# Altium footprint library WR-MPC3.PcbLib: 235 footprints (part 5 of 15)
Each footprint in its own frame and in the unit in brackets; x right, y up, seen from the top. Pads: shape width x height; smd on the part's side, far side on the other; paste and mask are expansions set on the pad; w line width, h text height; cw(c..) or ccw(c..) is an arc to the next point about the centre after c.
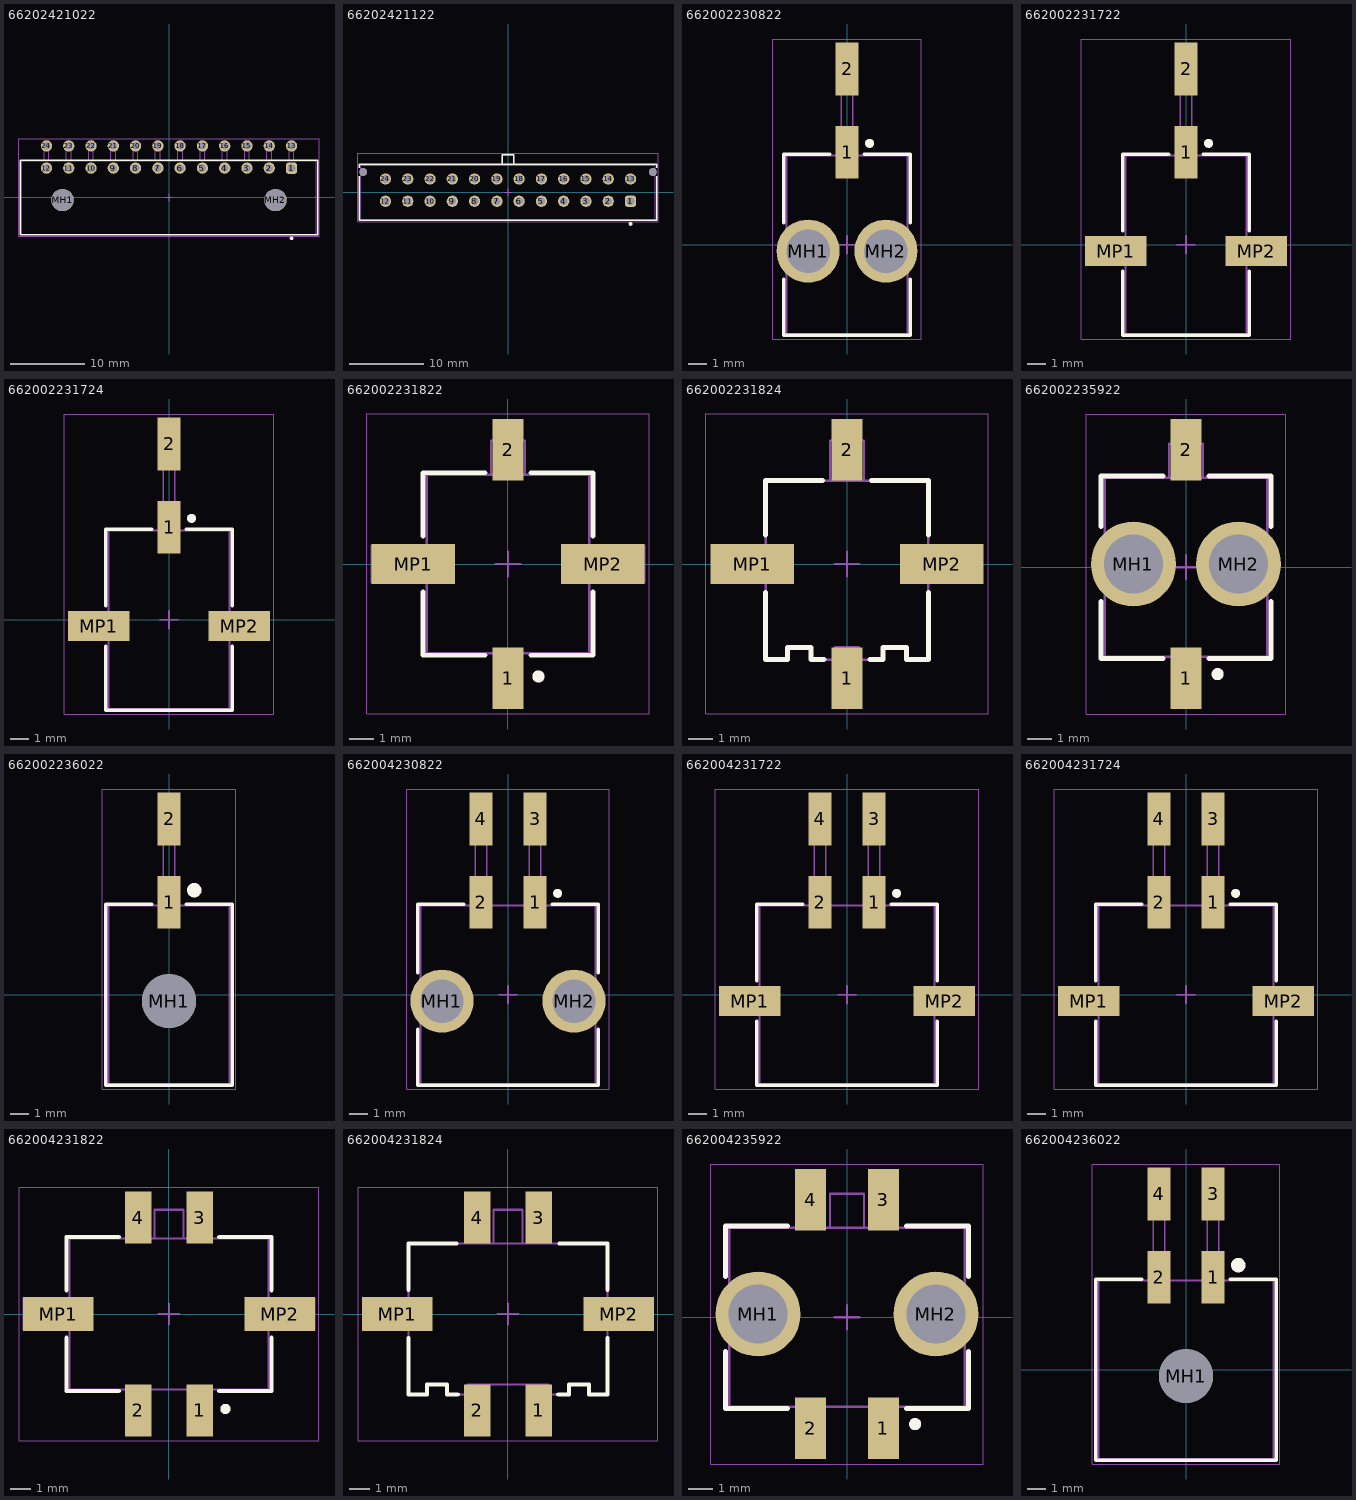
[diagram p4: the footprints below, top view; thin cyan lines are the x and y axes]

## 66202421022 [mm] "Dual row Right angle header With plastic peg 24p"
height 8.76
pads (26):
  rrect50% 1.52x1.52 hole 1.02: 1(16.5,3.95)
  round 1.52 hole 1.02: 2(13.5,3.95) 3(10.5,3.95) 4(7.5,3.95) 5(4.5,3.95) 6(1.5,3.95) 7(-1.5,3.95) 8(-4.5,3.95) 9(-7.5,3.95) 10(-10.5,3.95) 11(-13.5,3.95) 12(-16.5,3.95) 13(16.5,6.95) 14(13.5,6.95) 15(10.5,6.95) 16(7.5,6.95) 17(4.5,6.95) 18(1.5,6.95) 19(-1.5,6.95) 20(-4.5,6.95) 21(-7.5,6.95) 22(-10.5,6.95) 23(-13.5,6.95) 24(-16.5,6.95)
  round 3 hole 3 unplated: MH1(-14.34,-0.35) MH2(14.34,-0.35)
Top Overlay:
  circle w0.25: c16.5,-5.5 r0.125
  lines w0.2: -20,-5.025 -20,5.025 20,5.025 20,-5.025 -20,-5.025
Top Assembly:
  lines w0.1: -16.82,4.95 -16.82,7.27 -16.18,7.27 -16.18,4.95 ; -13.82,4.95 -13.82,7.27 -13.18,7.27 -13.18,4.95 ; -10.82,4.95 -10.82,7.27 -10.18,7.27 -10.18,4.95 ; -7.82,4.95 -7.82,7.27 -7.18,7.27 -7.18,4.95 ; -4.82,4.95 -4.82,7.27 -4.18,7.27 -4.18,4.95 ; -1.82,4.95 -1.82,7.27 -1.18,7.27 -1.18,4.95 ; 1.18,4.95 1.18,7.27 1.82,7.27 1.82,4.95 ; 4.18,4.95 4.18,7.27 4.82,7.27 4.82,4.95 ; 7.18,4.95 7.18,7.27 7.82,7.27 7.82,4.95 ; 10.18,4.95 10.18,7.27 10.82,7.27 10.82,4.95 ; 13.18,4.95 13.18,7.27 13.82,7.27 13.82,4.95 ; 16.18,4.95 16.18,7.27 16.82,7.27 16.82,4.95 ; -19.85,-4.95 -19.85,4.95 19.85,4.95 19.85,-4.95 -19.85,-4.95
Top Designator:
  text ".Designator" at -3.647,-0.357 h1
Top 3D Body:
  lines w0.1: -16.82,4.95 -16.82,7.27 -16.18,7.27 -16.18,4.95 ; -13.82,4.95 -13.82,7.27 -13.18,7.27 -13.18,4.95 ; -10.82,4.95 -10.82,7.27 -10.18,7.27 -10.18,4.95 ; -7.82,4.95 -7.82,7.27 -7.18,7.27 -7.18,4.95 ; -4.82,4.95 -4.82,7.27 -4.18,7.27 -4.18,4.95 ; -1.82,4.95 -1.82,7.27 -1.18,7.27 -1.18,4.95 ; 1.18,4.95 1.18,7.27 1.82,7.27 1.82,4.95 ; 4.18,4.95 4.18,7.27 4.82,7.27 4.82,4.95 ; 7.18,4.95 7.18,7.27 7.82,7.27 7.82,4.95 ; 10.18,4.95 10.18,7.27 10.82,7.27 10.82,4.95 ; 13.18,4.95 13.18,7.27 13.82,7.27 13.82,4.95 ; 16.18,4.95 16.18,7.27 16.82,7.27 16.82,4.95 ; -19.85,-4.95 19.85,-4.95 19.85,4.95 -19.85,4.95 -19.85,-4.95
Top Courtyard:
  lines w0.05: -20.2,-5.225 -20.2,7.91 20.2,7.91 20.2,-5.225 -20.2,-5.225
Top Component Center:
  lines w0.1: -0.5,0 0.5,0 ; 0,-0.5 0,0.5
3D body "62002421022.stp": height 8.79, standoff -3.17, extent -19.85,-4.95 19.85,7.27

## 66202421122 [mm] "Dual row Vertical header 26p"
height 9.9
pads (26):
  rrect50% 1.52x1.52 hole 1.02: 1(16.5,-1.2)
  round 1.52 hole 1.02: 2(13.5,-1.2) 3(10.5,-1.2) 4(7.5,-1.2) 5(4.5,-1.2) 6(1.5,-1.2) 7(-1.5,-1.2) 8(-4.5,-1.2) 9(-7.5,-1.2) 10(-10.5,-1.2) 11(-13.5,-1.2) 12(-16.5,-1.2) 13(16.5,1.8) 14(13.5,1.8) 15(10.5,1.8) 16(7.5,1.8) 17(4.5,1.8) 18(1.5,1.8) 19(-1.5,1.8) 20(-4.5,1.8) 21(-7.5,1.8) 22(-10.5,1.8) 23(-13.5,1.8) 24(-16.5,1.8)
  round 1.02 hole 1.02 unplated: MH1(-19.5,2.74) MH2(19.5,2.74)
Top Overlay:
  circle w0.25: c16.5,-4.25 r0.125
  lines w0.2: -20,2.145 -20,-3.755 20,-3.755 20,2.145 ; -20,3.345 -20,3.755 20,3.755 20,3.345 ; -0.8,3.755 -0.8,5.08 0.8,5.08 0.8,3.755
Top Assembly:
  lines w0.1: -0.8,3.68 -0.8,5.08 0.8,5.08 0.8,3.68 ; -19.85,-3.68 -19.85,3.68 19.85,3.68 19.85,-3.68 -19.85,-3.68
Top Designator:
  text ".Designator" at -3.647,-0.357 h1
Top 3D Body:
  lines w0.1: -0.8,3.68 -0.8,5.08 0.8,5.08 0.8,3.68 ; -19.85,-3.68 -19.85,3.68 19.85,3.68 19.85,-3.68 -19.85,-3.68
Top Courtyard:
  lines w0.05: -20.2,-3.955 -20.2,5.28 20.2,5.28 20.2,-3.955 -20.2,-3.955
Top Component Center:
  lines w0.1: -0.5,0 0.5,0 ; 0,-0.5 0,0.5
3D body "66202421122.stp": height 9.93, standoff -3.17, extent -19.85,-3.68 19.85,5.08

## 662002230822 [mm] "Dual row SMT Right angle header With TH Metal Clip 02p"
height 8.76
pads (4):
  rect 1.27x2.92 smd: 1(0,5.13) 2(0,9.75)
  round 3.5 hole 2.41: MH1(-2.16,-0.35) MH2(2.16,-0.35)
Top Overlay:
  circle w0.25: c1.25,5.625 r0.125
  lines w0.2: -3.5,-1.925 -3.5,-5.025 3.5,-5.025 3.5,-1.925 ; -3.5,1.225 -3.5,5.025 -0.95,5.025 ; 0.95,5.025 3.5,5.025 3.5,1.225
Top Assembly:
  lines w0.1: -0.32,4.95 -0.32,10.95 0.32,10.95 0.32,4.95 ; -0.32,6.3 0.32,6.3 ; -3.35,-4.95 -3.35,4.95 3.35,4.95 3.35,-4.95 -3.35,-4.95
Top Designator:
  text ".Designator" at -3.647,-0.357 h1
Top 3D Body:
  lines w0.1: -0.32,4.95 -0.32,10.95 0.32,10.95 0.32,4.95 ; -0.32,6.3 0.32,6.3 ; -3.35,-4.95 -3.35,4.95 3.35,4.95 3.35,-4.95 -3.35,-4.95
Top Courtyard:
  lines w0.05: -4.11,-5.225 4.11,-5.225 4.11,11.41 -4.11,11.41 -4.11,-5.225
Top Component Center:
  lines w0.1: -0.5,0 0.5,0 ; 0,-0.5 0,0.5
3D body "662002230822.stp": height 8.78, standoff -3.08, extent -3.35,-4.95 3.35,10.95

## 662002231722 [mm] "3.00mm SMT Male Dual Row Angled Header with SMT Solder Tab, 2p"
height 8.26
pads (4):
  rect 1.27x2.92 smd: 1(0,5.13) 2(0,9.75)
  rect 3.43x1.65 smd: MP1(-3.895,-0.35) MP2(3.895,-0.35)
Top Overlay:
  circle w0.25: c1.25,5.625 r0.125
  lines w0.2: -3.5,-1.475 -3.5,-5.025 3.5,-5.025 3.5,-1.475 ; -3.5,0.775 -3.5,5.025 -0.95,5.025 ; 0.95,5.025 3.5,5.025 3.5,0.775
Top Assembly:
  lines w0.1: -3.35,-1.1 -5.05,-1.1 -5.05,0.4 -3.35,0.4 ; -0.32,4.95 -0.32,10.95 0.32,10.95 0.32,4.95 ; -0.32,6.3 0.32,6.3 ; 3.35,-1.1 5.05,-1.1 5.05,0.4 3.35,0.4 ; -3.35,-4.95 -3.35,4.95 3.35,4.95 3.35,-4.95 -3.35,-4.95
Top Designator:
  text ".Designator" at -3.647,-0.357 h1
Top 3D Body:
  lines w0.1: -3.35,-1.1 -5.05,-1.1 -5.05,0.4 -3.35,0.4 ; -0.32,4.95 -0.32,10.95 0.32,10.95 0.32,4.95 ; -0.32,6.3 0.32,6.3 ; 3.35,-1.1 5.05,-1.1 5.05,0.4 3.35,0.4 ; -3.35,-4.95 -3.35,4.95 3.35,4.95 3.35,-4.95 -3.35,-4.95
Top Courtyard:
  lines w0.05: -5.81,-5.225 -5.81,11.41 5.81,11.41 5.81,-5.225 -5.81,-5.225
Top Component Center:
  lines w0.1: -0.5,0 0.5,0 ; 0,-0.5 0,0.5
3D body "662002231722.stp": height 8.79, standoff 0.03, extent -5.05,-4.95 5.05,10.95

## 662002231724 [mm] "3.00mm SMT Male Dual Row Angled Header with SMT Solder Tab, 2p"
height 8.26
pads (4):
  rect 1.27x2.92 smd: 1(0,5.13) 2(0,9.75)
  rect 3.43x1.65 smd: MP1(-3.895,-0.35) MP2(3.895,-0.35)
Top Overlay:
  circle w0.25: c1.25,5.625 r0.125
  lines w0.2: -3.5,-1.475 -3.5,-5.025 3.5,-5.025 3.5,-1.475 ; -3.5,0.775 -3.5,5.025 -0.95,5.025 ; 0.95,5.025 3.5,5.025 3.5,0.775
Top Assembly:
  lines w0.1: -3.35,-1.1 -5.05,-1.1 -5.05,0.4 -3.35,0.4 ; -0.32,4.95 -0.32,10.95 0.32,10.95 0.32,4.95 ; -0.32,6.3 0.32,6.3 ; 3.35,-1.1 5.05,-1.1 5.05,0.4 3.35,0.4 ; -3.35,-4.95 3.35,-4.95 3.35,4.95 -3.35,4.95 -3.35,-4.95
Top Designator:
  text ".Designator" at -3.647,-0.357 h1
Top 3D Body:
  lines w0.1: -3.35,-1.1 -5.05,-1.1 -5.05,0.4 -3.35,0.4 ; -0.32,4.95 -0.32,10.95 0.32,10.95 0.32,4.95 ; -0.32,6.3 0.32,6.3 ; 3.35,-1.1 5.05,-1.1 5.05,0.4 3.35,0.4 ; -3.35,-4.95 3.35,-4.95 3.35,4.95 -3.35,4.95 -3.35,-4.95
Top Courtyard:
  lines w0.05: -5.81,-5.225 5.81,-5.225 5.81,11.41 -5.81,11.41 -5.81,-5.225
Top Component Center:
  lines w0.1: -0.5,0 0.5,0 ; 0,-0.5 0,0.5
3D body "662002231724.stp": height 8.76, standoff 0, extent -5.05,-4.95 5.05,10.95

## 662002231822 [mm] "3.00mm SMT Male Dual Row Vertical Header with SMT Solder Tab, 2p"
height 9.9
pads (4):
  rect 1.27x2.54 smd: 1(0,-4.7) 2(0,4.7)
  rect 3.43x1.65 smd: MP1(-3.895,0) MP2(3.895,0)
Top Overlay:
  circle w0.25: c1.25,-4.625 r0.125
  lines w0.2: -3.5,-1.155 -3.5,-3.755 -0.95,-3.755 ; -3.5,1.155 -3.5,3.755 -0.95,3.755 ; 0.95,-3.755 3.5,-3.755 3.5,-1.155 ; 0.95,3.755 3.5,3.755 3.5,1.155
Top Assembly:
  lines w0.1: -3.35,-0.75 -5.6,-0.75 -5.6,0.75 -3.35,0.75 ; -0.7,3.68 -0.7,5.08 0.7,5.08 0.7,3.68 ; -0.32,-3.68 -0.32,-5.698 0.32,-5.698 0.32,-3.68 ; -0.32,3.68 -0.32,5.698 0.32,5.698 0.32,3.68 ; 5.6,-0.75 5.6,0.75 ; 5.6,-0.75 5.6,0.75 ; 5.6,-0.75 3.35,-0.75 5.6,-0.75 ; 5.6,0.75 3.35,0.75 5.6,0.75 ; -3.35,-3.68 -3.35,3.68 3.35,3.68 3.35,-3.68 -3.35,-3.68
Top Designator:
  text ".Designator" at -3.647,-0.357 h1
Top 3D Body:
  lines w0.1: -3.35,-0.75 -5.6,-0.75 -5.6,0.75 -3.35,0.75 ; -0.7,3.68 -0.7,5.08 0.7,5.08 0.7,3.68 ; -0.32,-3.68 -0.32,-5.698 0.32,-5.698 0.32,-3.68 ; -0.32,3.68 -0.32,5.698 0.32,5.698 0.32,3.68 ; 5.6,-0.75 5.6,0.75 ; 5.6,-0.75 3.35,-0.75 5.6,-0.75 ; 5.6,-0.75 5.6,0.75 ; 5.6,0.75 3.35,0.75 5.6,0.75 ; -3.35,-3.68 -3.35,3.68 3.35,3.68 3.35,-3.68 -3.35,-3.68
Top Courtyard:
  lines w0.05: -5.81,-6.17 5.81,-6.17 5.81,6.17 -5.81,6.17 -5.81,-6.17
Top Component Center:
  lines w0.1: -0.5,0 0.5,0 ; 0,-0.5 0,0.5
3D body "662002231822.stp": height 9.93, standoff 0.03, extent -5.6,-5.698 5.6,5.698

## 662002231824 [mm] "3.00mm SMT Male Dual Row Vertical Header with SMT Solder Tab, 2p"
height 9.9
pads (4):
  rect 1.27x2.54 smd: 1(0,-4.7) 2(0,4.7)
  rect 3.43x1.65 smd: MP1(-3.895,0) MP2(3.895,0)
Top Overlay:
  lines w0.2: -3.35,-1.17 -3.35,-3.93 -2.45,-3.93 -2.45,-3.43 -1.48,-3.43 -1.48,-3.93 -0.95,-3.93 ; -3.35,1.18 -3.35,3.43 -1.003,3.43 ; 0.95,-3.93 1.48,-3.93 1.48,-3.43 2.45,-3.43 2.45,-3.93 3.35,-3.93 3.35,-1.17 ; 1.003,3.43 3.35,3.43 3.35,1.18
Top Assembly:
  lines w0.1: -3.35,-0.75 -5.05,-0.75 -5.05,0.75 -3.35,0.75 ; -0.7,3.43 -0.7,5.08 0.7,5.08 0.7,3.43 ; -0.32,-3.43 -0.32,-5.698 0.32,-5.698 0.32,-3.43 ; -0.32,3.43 -0.32,5.698 0.32,5.698 0.32,3.43 ; 3.35,-0.75 5.05,-0.75 5.05,0.75 3.35,0.75 ; -3.35,-3.93 -3.35,3.43 3.35,3.43 3.35,-3.93 2.45,-3.93 2.45,-3.43 1.48,-3.43 1.48,-3.93 0.48,-3.93 0.48,-3.43 -0.48,-3.43 -0.48,-3.93 -1.48,-3.93 -1.48,-3.43 -2.45,-3.43 -2.45,-3.93 -3.35,-3.93
Top Designator:
  text ".Designator" at -3.647,-0.357 h1
Top Courtyard:
  lines w0.05: -5.81,-6.17 -5.81,6.17 5.81,6.17 5.81,-6.17 -5.81,-6.17
Top Component Center:
  lines w0.1: -0.5,0 0.5,0 ; 0,-0.5 0,0.5
3D body "662002231824.stp": height 9.93, standoff 0.03, extent -5.045,-5.698 5.045,5.698

## 662002235922 [mm] "Dual row SMT Vertical header With TH metal clip 02p"
height 9.9
pads (4):
  rect 1.27x2.54 smd: 1(0,-4.57) 2(0,4.83)
  round 3.5 hole 2.41: MH1(-2.16,0.13) MH2(2.16,0.13)
Top Overlay:
  circle w0.25: c1.3,-4.4 r0.125
  lines w0.2: -3.5,-1.405 -3.5,-3.755 -0.95,-3.755 ; -3.5,1.665 -3.5,3.755 -0.95,3.755 ; 0.95,-3.755 3.5,-3.755 3.5,-1.405 ; 0.95,3.755 3.5,3.755 3.5,1.665
Top Assembly:
  lines w0.1: -0.7,3.68 -0.7,5.08 0.7,5.08 0.7,3.68 ; -0.32,-3.68 -0.32,-5.5 0.32,-5.5 0.32,-3.68 ; -0.32,3.68 -0.32,5.9 0.32,5.9 0.32,3.68 ; -3.35,-3.68 3.35,-3.68 3.35,3.68 -3.35,3.68 -3.35,-3.68
Top Designator:
  text ".Designator" at -3.647,-0.357 h1
Top 3D Body:
  lines w0.1: -0.7,3.68 -0.7,5.08 0.7,5.08 0.7,3.68 ; -0.32,-3.68 -0.32,-5.5 0.32,-5.5 0.32,-3.68 ; -0.32,3.68 -0.32,5.9 0.32,5.9 0.32,3.68 ; -3.35,-3.68 3.35,-3.68 3.35,3.68 -3.35,3.68 -3.35,-3.68
Top Courtyard:
  lines w0.05: -4.11,-6.04 4.11,-6.04 4.11,6.3 -4.11,6.3 -4.11,-6.04
Top Component Center:
  lines w0.1: -0.5,0 0.5,0 ; 0,-0.5 0,0.5
3D body "662002235922.stp": height 9.92, standoff -3.08, extent -3.35,-5.5 3.35,5.9

## 662002236022 [mm] "3.00mm SMT Male Dual Row Angled Header with Plastic Pegs, 2p"
height 8.26
pads (3):
  rect 1.27x2.92 smd: 1(0,5.13) 2(0,9.75)
  round 3 hole 3 unplated: MH1(0,-0.35)
Top Overlay:
  circle w0.4: c1.4,5.8 r0.2
  lines w0.2: -0.95,5.025 -3.5,5.025 -3.5,-5.025 3.5,-5.025 3.5,5.025 0.95,5.025
Top Assembly:
  lines w0.1: -0.32,4.95 -0.32,10.95 0.32,10.95 0.32,4.95 ; -0.32,6.3 0.32,6.3 ; -3.35,-4.95 -3.35,4.95 3.35,4.95 3.35,-4.95 -3.35,-4.95
Top Designator:
  text ".Designator" at -3.647,-0.357 h1
Top 3D Body:
  lines w0.1: -0.32,4.95 -0.32,10.95 0.32,10.95 0.32,4.95 ; -0.32,6.3 0.32,6.3 ; -3.35,-4.95 -3.35,4.95 3.35,4.95 3.35,-4.95 -3.35,-4.95
Top Courtyard:
  lines w0.05: -3.7,-5.225 -3.7,11.41 3.7,11.41 3.7,-5.225 -3.7,-5.225
Top Component Center:
  lines w0.1: -0.5,0 0.5,0 ; 0,-0.5 0,0.5
3D body "662002236022.stp": height 8.79, standoff -3.17, extent -3.35,-4.95 3.35,10.95

## 662004230822 [mm] "Dual row SMT Right angle header With TH Metal Clip 03p"
height 8.76
pads (6):
  rect 1.27x2.92 smd: 1(1.5,5.13) 2(-1.5,5.13) 3(1.5,9.75) 4(-1.5,9.75)
  round 3.5 hole 2.41: MH1(-3.66,-0.35) MH2(3.66,-0.35)
Top Overlay:
  circle w0.25: c2.75,5.625 r0.125
  lines w0.2: -5,-1.925 -5,-5.025 5,-5.025 5,-1.925 ; -5,1.225 -5,5.025 -2.45,5.025 ; 2.45,5.025 5,5.025 5,1.225
Top Assembly:
  lines w0.1: -1.82,4.95 -1.82,10.95 -1.18,10.95 -1.18,4.95 ; -1.82,6.3 -1.18,6.3 ; 1.18,4.95 1.18,10.95 1.82,10.95 1.82,4.95 ; 1.18,6.3 1.82,6.3 ; -4.85,-4.95 -4.85,4.95 4.85,4.95 4.85,-4.95 -4.85,-4.95
Top Designator:
  text ".Designator" at -3.647,-0.357 h1
Top 3D Body:
  lines w0.1: -1.82,4.95 -1.82,10.95 -1.18,10.95 -1.18,4.95 ; -1.82,6.3 -1.18,6.3 ; 1.18,4.95 1.18,10.95 1.82,10.95 1.82,4.95 ; 1.18,6.3 1.82,6.3 ; -4.85,-4.95 -4.85,4.95 4.85,4.95 4.85,-4.95 -4.85,-4.95
Top Courtyard:
  lines w0.05: -5.61,-5.225 5.61,-5.225 5.61,11.41 -5.61,11.41 -5.61,-5.225
Top Component Center:
  lines w0.1: -0.5,0 0.5,0 ; 0,-0.5 0,0.5
3D body "662004230822.stp": height 8.78, standoff -3.08, extent -4.85,-4.95 4.85,10.95

## 662004231722 [mm] "3.00mm SMT Male Dual Row Angled Header with SMT Solder Tab, 4p"
height 8.26
pads (6):
  rect 1.27x2.92 smd: 1(1.5,5.13) 2(-1.5,5.13) 3(1.5,9.75) 4(-1.5,9.75)
  rect 3.43x1.65 smd: MP1(-5.395,-0.35) MP2(5.395,-0.35)
Top Overlay:
  circle w0.25: c2.75,5.625 r0.125
  lines w0.2: -5,-1.475 -5,-5.025 5,-5.025 5,-1.475 ; -5,0.775 -5,5.025 -2.45,5.025 ; 2.45,5.025 5,5.025 5,0.775
Top Assembly:
  lines w0.1: -4.85,-1.1 -6.55,-1.1 -6.55,0.4 -4.85,0.4 ; -1.82,4.95 -1.82,10.95 -1.18,10.95 -1.18,4.95 ; -1.82,6.3 -1.18,6.3 ; 1.18,4.95 1.18,10.95 1.82,10.95 1.82,4.95 ; 1.18,6.3 1.82,6.3 ; 4.85,-1.1 6.55,-1.1 6.55,0.4 4.85,0.4 ; -4.85,-4.95 4.85,-4.95 4.85,4.95 -4.85,4.95 -4.85,-4.95
Top Designator:
  text ".Designator" at -3.647,-0.357 h1
Top 3D Body:
  lines w0.1: -4.85,-1.1 -6.55,-1.1 -6.55,0.4 -4.85,0.4 ; -1.82,4.95 -1.82,10.95 -1.18,10.95 -1.18,4.95 ; -1.82,6.3 -1.18,6.3 ; 1.18,4.95 1.18,10.95 1.82,10.95 1.82,4.95 ; 1.18,6.3 1.82,6.3 ; 4.85,-1.1 6.55,-1.1 6.55,0.4 4.85,0.4 ; -4.85,-4.95 -4.85,4.95 4.85,4.95 4.85,-4.95 -4.85,-4.95
Top Courtyard:
  lines w0.05: -7.31,-5.225 -7.31,11.41 7.31,11.41 7.31,-5.225 -7.31,-5.225
Top Component Center:
  lines w0.1: -0.5,0 0.5,0 ; 0,-0.5 0,0.5
3D body "662004231722.stp": height 8.79, standoff 0.03, extent -6.55,-4.95 6.55,10.95

## 662004231724 [mm] "3.00mm SMT Male Dual Row Angled Header with SMT Solder Tab, 4p"
height 8.26
pads (6):
  rect 1.27x2.92 smd: 1(1.5,5.13) 2(-1.5,5.13) 3(1.5,9.75) 4(-1.5,9.75)
  rect 3.43x1.65 smd: MP1(-5.395,-0.35) MP2(5.395,-0.35)
Top Overlay:
  circle w0.25: c2.75,5.625 r0.125
  lines w0.2: -5,-1.475 -5,-5.025 5,-5.025 5,-1.475 ; -5,0.775 -5,5.025 -2.45,5.025 ; 2.45,5.025 5,5.025 5,0.775
Top Assembly:
  lines w0.1: -4.85,-1.1 -6.55,-1.1 -6.55,0.4 -4.85,0.4 ; -1.82,4.95 -1.82,10.95 -1.18,10.95 -1.18,4.95 ; -1.82,6.3 -1.18,6.3 ; 1.18,4.95 1.18,10.95 1.82,10.95 1.82,4.95 ; 1.18,6.3 1.82,6.3 ; 4.85,-1.1 6.55,-1.1 6.55,0.4 4.85,0.4 ; -4.85,-4.95 -4.85,4.95 4.85,4.95 4.85,-4.95 -4.85,-4.95
Top Designator:
  text ".Designator" at -3.647,-0.357 h1
Top 3D Body:
  lines w0.1: -4.85,-1.1 -6.55,-1.1 -6.55,0.4 -4.85,0.4 ; -1.82,4.95 -1.82,10.95 -1.18,10.95 -1.18,4.95 ; -1.82,6.3 -1.18,6.3 ; 1.18,4.95 1.18,10.95 1.82,10.95 1.82,4.95 ; 1.18,6.3 1.82,6.3 ; 4.85,-1.1 6.55,-1.1 6.55,0.4 4.85,0.4 ; -4.85,-4.95 4.85,-4.95 4.85,4.95 -4.85,4.95 -4.85,-4.95
Top Courtyard:
  lines w0.05: -7.31,-5.225 7.31,-5.225 7.31,11.41 -7.31,11.41 -7.31,-5.225
Top Component Center:
  lines w0.1: -0.5,0 0.5,0 ; 0,-0.5 0,0.5
3D body "662004231724.stp": height 8.76, standoff 0, extent -6.55,-4.95 6.55,10.95

## 662004231822 [mm] "3.00mm SMT Male Dual Row Vertical Header with SMT Solder Tab, 4p"
height 9.9
pads (6):
  rect 1.27x2.54 smd: 1(1.5,-4.7) 2(-1.5,-4.7) 3(1.5,4.7) 4(-1.5,4.7)
  rect 3.43x1.65 smd: MP1(-5.395,0) MP2(5.395,0)
Top Overlay:
  circle w0.25: c2.75,-4.625 r0.125
  lines w0.2: -5,-1.155 -5,-3.755 -2.45,-3.755 ; -5,1.155 -5,3.755 -2.45,3.755 ; 2.45,-3.755 5,-3.755 5,-1.155 ; 2.45,3.755 5,3.755 5,1.155
Top Assembly:
  lines w0.1: -4.85,-0.75 -7.1,-0.75 -7.1,0.75 -4.85,0.75 ; -1.82,-3.68 -1.82,-5.698 -1.18,-5.698 -1.18,-3.68 ; -1.82,3.68 -1.82,5.698 -1.18,5.698 -1.18,3.68 ; -0.7,3.68 -0.7,5.08 0.7,5.08 0.7,3.68 ; 1.18,-3.68 1.18,-5.698 1.82,-5.698 1.82,-3.68 ; 1.18,3.68 1.18,5.698 1.82,5.698 1.82,3.68 ; 4.85,-0.75 7.1,-0.75 7.1,0.75 4.85,0.75 ; -4.85,-3.68 4.85,-3.68 4.85,3.68 -4.85,3.68 -4.85,-3.68
Top Designator:
  text ".Designator" at -3.647,-0.357 h1
Top 3D Body:
  lines w0.1: -4.85,-0.75 -7.1,-0.75 -7.1,0.75 -4.85,0.75 ; -1.82,-3.68 -1.82,-5.698 -1.18,-5.698 -1.18,-3.68 ; -1.82,3.68 -1.82,5.698 -1.18,5.698 -1.18,3.68 ; -0.7,3.68 -0.7,5.08 0.7,5.08 0.7,3.68 ; 1.18,-3.68 1.18,-5.698 1.82,-5.698 1.82,-3.68 ; 1.18,3.68 1.18,5.698 1.82,5.698 1.82,3.68 ; 4.85,-0.75 7.1,-0.75 7.1,0.75 4.85,0.75 ; -4.85,-3.68 -4.85,3.68 4.85,3.68 4.85,-3.68 -4.85,-3.68
Top Courtyard:
  lines w0.05: -7.31,-6.17 7.31,-6.17 7.31,6.17 -7.31,6.17 -7.31,-6.17
Top Component Center:
  lines w0.1: -0.5,0 0.5,0 ; 0,-0.5 0,0.5
3D body "662004231822.stp": height 9.93, standoff 0.03, extent -7.1,-5.698 7.1,5.698

## 662004231824 [mm] "3.00mm SMT Male Dual Row Vertical Header with SMT Solder Tab, 4p"
height 9.9
pads (6):
  rect 1.27x2.54 smd: 1(1.5,-4.7) 2(-1.5,-4.7) 3(1.5,4.7) 4(-1.5,4.7)
  rect 3.43x1.65 smd: MP1(-5.395,0) MP2(5.395,0)
Top Overlay:
  lines w0.2: -4.85,-1.17 -4.85,-3.93 -3.95,-3.93 -3.95,-3.43 -2.98,-3.43 -2.98,-3.93 -2.45,-3.93 ; -4.85,1.18 -4.85,3.43 -2.503,3.43 ; 2.45,-3.93 2.98,-3.93 2.98,-3.43 3.95,-3.43 3.95,-3.93 4.85,-3.93 4.85,-1.17 ; 2.503,3.43 4.85,3.43 4.85,1.18
Top Assembly:
  lines w0.1: -4.85,-0.75 -6.55,-0.75 -6.55,0.75 -4.85,0.75 ; -1.82,-3.43 -1.82,-5.698 -1.18,-5.698 -1.18,-3.43 ; -1.82,3.43 -1.82,5.698 -1.18,5.698 -1.18,3.43 ; -0.7,3.43 -0.7,5.08 0.7,5.08 0.7,3.43 ; 1.18,-3.43 1.18,-5.698 1.82,-5.698 1.82,-3.43 ; 1.18,3.43 1.18,5.698 1.82,5.698 1.82,3.43 ; 4.85,-0.75 6.55,-0.75 6.55,0.75 4.85,0.75 ; -4.85,-3.93 -3.95,-3.93 -3.95,-3.43 -2.98,-3.43 -2.98,-3.93 -1.98,-3.93 -1.98,-3.43 1.98,-3.43 1.98,-3.93 2.98,-3.93 2.98,-3.43 3.95,-3.43 3.95,-3.93 4.85,-3.93 4.85,3.43 -4.85,3.43 -4.85,-3.93
Top Designator:
  text ".Designator" at -3.647,-0.357 h1
Top Courtyard:
  lines w0.05: -7.31,-6.17 -7.31,6.17 7.31,6.17 7.31,-6.17 -7.31,-6.17
Top Component Center:
  lines w0.1: -0.5,0 0.5,0 ; 0,-0.5 0,0.5
3D body "662004231824.stp": height 9.93, standoff 0.03, extent -6.545,-5.698 6.545,5.698

## 662004235922 [mm] "Dual row SMT Vertical header With TH metal clip 04p"
height 9.9
pads (6):
  rect 1.27x2.54 smd: 1(1.5,-4.57) 2(-1.5,-4.57) 3(1.5,4.83) 4(-1.5,4.83)
  round 3.5 hole 2.41: MH1(-3.66,0.13) MH2(3.66,0.13)
Top Overlay:
  circle w0.25: c2.8,-4.4 r0.125
  lines w0.2: -5,-1.405 -5,-3.755 -2.45,-3.755 ; -5,1.665 -5,3.755 -2.45,3.755 ; 2.45,-3.755 5,-3.755 5,-1.405 ; 2.45,3.755 5,3.755 5,1.665
Top Assembly:
  lines w0.1: -1.82,-3.68 -1.82,-5.5 -1.18,-5.5 -1.18,-3.68 ; -1.82,3.68 -1.82,5.9 -1.18,5.9 -1.18,3.68 ; -0.7,3.68 -0.7,5.08 0.7,5.08 0.7,3.68 ; 1.18,-3.68 1.18,-5.5 1.82,-5.5 1.82,-3.68 ; 1.18,3.68 1.18,5.9 1.82,5.9 1.82,3.68 ; -4.85,-3.68 4.85,-3.68 4.85,3.68 -4.85,3.68 -4.85,-3.68
Top Designator:
  text ".Designator" at -3.647,-0.357 h1
Top 3D Body:
  lines w0.1: -1.82,-3.68 -1.82,-5.5 -1.18,-5.5 -1.18,-3.68 ; -1.82,3.68 -1.82,5.9 -1.18,5.9 -1.18,3.68 ; -0.7,3.68 -0.7,5.08 0.7,5.08 0.7,3.68 ; 1.18,-3.68 1.18,-5.5 1.82,-5.5 1.82,-3.68 ; 1.18,3.68 1.18,5.9 1.82,5.9 1.82,3.68 ; -4.85,-3.68 -4.85,3.68 4.85,3.68 4.85,-3.68 -4.85,-3.68
Top Courtyard:
  lines w0.05: -5.61,-6.04 -5.61,6.3 5.61,6.3 5.61,-6.04 -5.61,-6.04
Top Component Center:
  lines w0.1: -0.5,0 0.5,0 ; 0,-0.5 0,0.5
3D body "662004235922.stp": height 9.92, standoff -3.08, extent -4.85,-5.5 4.85,5.9

## 662004236022 [mm] "3.00mm SMT Male Dual Row Angled Header with Plastic Pegs, 4p"
height 8.26
pads (5):
  rect 1.27x2.92 smd: 1(1.5,5.13) 2(-1.5,5.13) 3(1.5,9.75) 4(-1.5,9.75)
  round 3 hole 3 unplated: MH1(0,-0.35)
Top Overlay:
  circle w0.4: c2.9,5.8 r0.2
  lines w0.2: -2.45,5.025 -5,5.025 -5,-5.025 5,-5.025 5,5.025 2.45,5.025
Top Assembly:
  lines w0.1: -1.82,4.95 -1.82,10.95 -1.18,10.95 -1.18,4.95 ; -1.82,6.3 -1.18,6.3 ; 1.18,4.95 1.18,10.95 1.82,10.95 1.82,4.95 ; 1.18,6.3 1.82,6.3 ; -4.85,-4.95 4.85,-4.95 4.85,4.95 -4.85,4.95 -4.85,-4.95
Top Designator:
  text ".Designator" at -3.647,-0.357 h1
Top 3D Body:
  lines w0.1: -1.82,4.95 -1.82,10.95 -1.18,10.95 -1.18,4.95 ; -1.82,6.3 -1.18,6.3 ; 1.18,4.95 1.18,10.95 1.82,10.95 1.82,4.95 ; 1.18,6.3 1.82,6.3 ; -4.85,-4.95 4.85,-4.95 4.85,4.95 -4.85,4.95 -4.85,-4.95
Top Courtyard:
  lines w0.05: -5.2,-5.225 5.2,-5.225 5.2,11.41 -5.2,11.41 -5.2,-5.225
Top Component Center:
  lines w0.1: -0.5,0 0.5,0 ; 0,-0.5 0,0.5
3D body "662004236022.stp": height 8.79, standoff -3.17, extent -4.85,-4.95 4.85,10.95